# EAGLE library part IC_TC7660S (library dp_devices.v6)
Super charge pump DC to DC converter http://www.digikey.com/product-detail/en/TC7660SEOA713/TC7660SEOA713TR-ND/418704
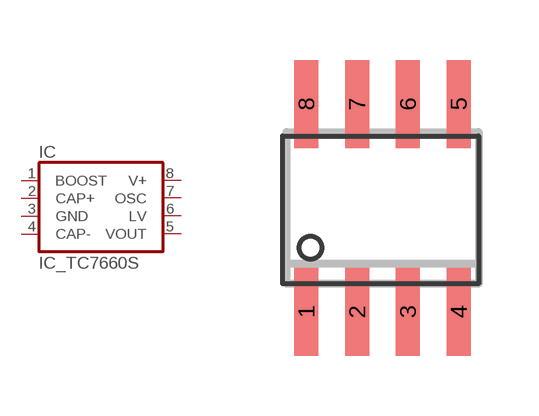
[diagram p163: symbol with the pads of SOIC-8; footprint SOIC-8]

Designator prefix IC

## IC_TC7660S  [SOIC-8]
1  BOOST
2  CAP+
3  GND  pwr
4  CAP-
5  VOUT  out
6  LV
7  OSC
8  V+  pwr

## Footprint SOIC-8 (pad centres in mm)
smd 0.6 x 2.2: 1 -1.905,-2.6; 2 -0.635,-2.6; 3 0.635,-2.6; 4 1.905,-2.6; 5 1.905,2.6; 6 0.635,2.6; 7 -0.635,2.6; 8 -1.905,2.6